# EAGLE library part CON_MOLEX_MALE_SMT_SH_1.25 (library dp_devices.v6)
Molex 1.25mm PicoBlade Header vertical SMT 10 circuits p/n: 533980771
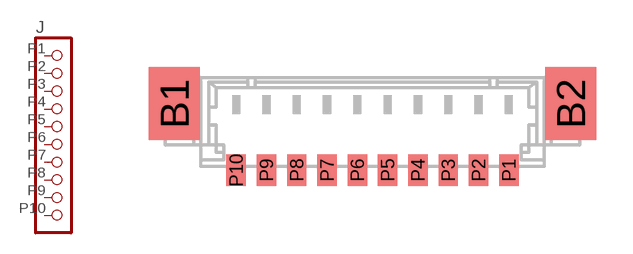
[diagram p208: symbol with the pads of MOLEX_533980771; footprint MOLEX_533980771]

Designator prefix J

## CON_MOLEX_MALE_SMT_SH_1.25  [MOLEX_533980771]
P1  1  pas
P2  2  pas
P3  3  pas
P4  4  pas
P5  5  pas
P6  6  pas
P7  7  pas
P8  8  pas
P9  9  pas
P10  10  pas

## Footprint MOLEX_533980771 (pad centres in mm)
smd 2.1 x 3: B1 -8.175,1.513; B2 8.175,1.513
smd 0.8 x 1.3: P1 5.625,-1.238; P2 4.375,-1.238; P3 3.125,-1.238; P4 1.875,-1.238; P5 0.625,-1.238; P6 -0.625,-1.238; P7 -1.875,-1.238; P8 -3.125,-1.238; P9 -4.375,-1.238; P10 -5.625,-1.238